# Altium footprint library Switches.PcbLib: 69 footprints (part 4 of 5)
Each footprint in its own frame and in the unit in brackets; x right, y up, seen from the top. Pads: shape width x height; smd on the part's side, far side on the other; paste and mask are expansions set on the pad; w line width, h text height; cw(c..) or ccw(c..) is an arc to the next point about the centre after c.
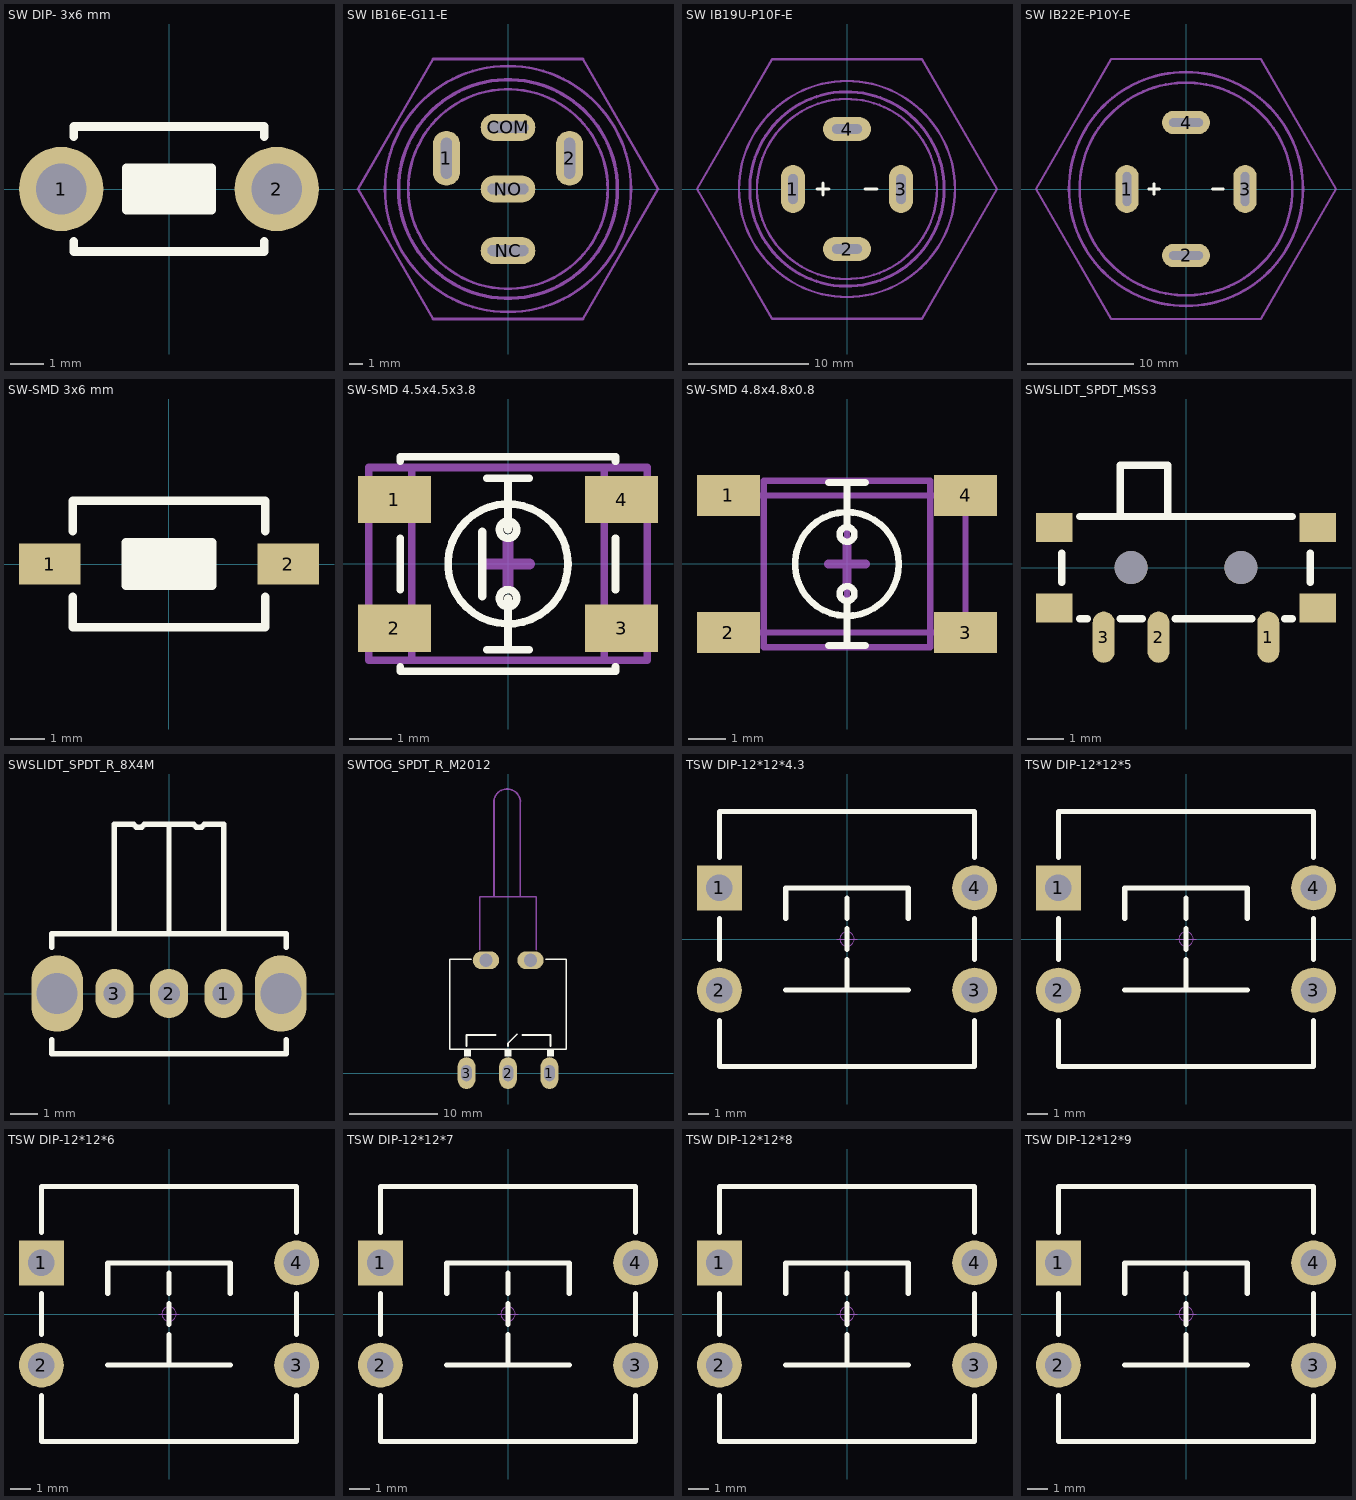
[diagram p3: the footprints below, top view; thin cyan lines are the x and y axes]

## SW DIP- 3x6 mm [mm] "Switch DIP type"
pads (2):
  round 2.5 hole 1.5: 1(-3.2,0) 2(3.2,0)
Top Overlay:
  rectangle: -1.27,-0.635 1.27,0.635
  lines w0.254: -2.819,-1.554 -2.819,-1.854 2.819,-1.854 2.819,-1.554 ; -2.819,1.554 -2.819,1.854 2.819,1.854 2.819,1.554 ; -1.27,-0.635 1.27,-0.635 1.27,0.635 -1.27,0.635 -1.27,-0.635
Top Designator:
  text ".Designator" at -3.71,-0.344 h1.52
3D body "NutNhan2ChanDIP.STEP": height 3.8, standoff -3.47, extent -3.82,-1.75 3.82,1.75

## SW IB16E-G11-E [mm]
pads (5):
  oval 2x4 hole 0.8 slot 3 at 90 deg: 1(-4.5,2.25) 2(4.5,2.25)
  oval 4x2 hole 0.8 slot 3 at 0 deg: COM(0,4.5) NC(0,-4.5) NO(0,0)
Mechanical 1:
  circle w0.2: c0,0 r7.3
  circle w0.254: c0,0 r8
Top Designator:
  text ".Designator" at -3.71,-0.344 h1.52
Mechanical 15:
  circle w0.2: c0,0 r9
  lines w0.2: -10.97,0 -5.485,-9.5 5.485,-9.5 10.97,0 5.485,9.5 -5.485,9.5 -10.97,0
3D body: height 28.3, standoff 0, extent -8,-8 8,8
3D body: height 28.3, standoff 25.3, extent -10.97,-9.5 10.97,9.5

## SW IB19U-P10F-E [mm]
pads (4):
  oval 2x4 hole 0.8 slot 2.5 at 90 deg: 1(-4.5,0) 3(4.5,0)
  oval 4x2 hole 0.8 slot 2.5 at 0 deg: 2(0,-5) 4(0,5)
Top Overlay:
  lines w0.254: -2.5,0 -1.5,0 ; -2,-0.5 -2,0.5 ; 1.5,0 2.5,0
Mechanical 1:
  circle w0.254: c0,0 r8.1
  circle w0.2: c0,0 r7.5
Top Designator:
  text ".Designator" at -3.71,-0.344 h1.52
Mechanical 15:
  circle w0.2: c0,0 r9
  lines w0.2: -12.5,0 -6.25,10.825 6.25,10.825 12.5,0 6.25,-10.825 -6.25,-10.825 -12.5,0
3D body: height 17.45, standoff 14.78, extent -12.5,-10.825 12.5,10.825
3D body: height 17.44, standoff 0, extent -8.1,-8.1 8.1,8.1

## SW IB22E-P10Y-E [mm]
pads (4):
  oval 2.2x4.5 hole 0.8 slot 3.2 at 90 deg: 1(-5.55,0) 3(5.55,0)
  oval 4.5x2.2 hole 0.8 slot 3.2 at 0 deg: 2(0,-6.25) 4(0,6.25)
Top Overlay:
  lines w0.254: -3.5,0 -2.5,0 ; -3,-0.5 -3,0.5 ; 2.5,0 3.5,0
Mechanical 1:
  circle w0.254: c0,0 r10
Top Designator:
  text ".Designator" at -3.71,-0.344 h1.52
Mechanical 15:
  circle w0.254: c0,0 r11
  lines w0.2: -14.1,0 -7.05,-12.211 7.05,-12.211 14.1,0 7.05,12.211 -7.05,12.211 -14.1,0
3D body: height 20, standoff 17, extent -14.1,-12.211 14.1,12.211
3D body: height 20, standoff 0, extent -11,-11 11,11

## SW-SMD 3x6 mm [mm] "Switch SMD type"
pads (2):
  rect 1.8x1.2 smd: 1(-3.5,0) 2(3.5,0)
Top Overlay:
  rectangle: -1.27,-0.635 1.27,0.635
  lines w0.254: -2.819,-0.965 -2.819,-1.854 2.819,-1.854 2.819,-0.965 ; -2.819,0.965 -2.819,1.854 2.819,1.854 2.819,0.965 ; -1.27,-0.635 -1.27,0.635 1.27,0.635 1.27,-0.635 -1.27,-0.635
Top Designator:
  text ".Designator" at -3.71,-0.344 h1.52
3D body "User Library-Button-SMD.step": height 2.5, standoff 0, extent -3.05,-1.85 3.05,1.85

## SW-SMD 4.5x4.5x3.8 [mm] "Switch SMD type"
pads (4):
  rect 1.7x1.1 smd: 1(-2.65,1.5) 2(-2.65,-1.5) 3(2.65,-1.5) 4(2.65,1.5)
Top Overlay:
  circle w0.178: c0,0.8 r0.2
  circle w0.178: c0,-0.8 r0.2
  circle w0.178: c0,0 r1.4
  lines w0.178: -2.516,-2.4 -2.516,-2.505 2.508,-2.505 2.508,-2.4 ; -2.516,-0.6 -2.516,0.6 ; -2.516,2.4 -2.516,2.502 2.508,2.502 2.508,2.4 ; -0.5,-2 0.5,-2 ; -0.5,2 0.5,2 ; 0,-2 0,-0.8 ; 0,0.8 0,2 ; 2.508,-0.6 2.508,0.6
  lines w0.2: -0.6,-0.75 -0.6,0.75
Top 3D Body:
  lines w0.178: -3.25,-2.25 3.25,-2.25 3.25,2.25 -3.25,2.25 -3.25,-2.25
Top Designator:
  text ".Designator" at -3.71,-0.346 h1.52
Mechanical 15:
  lines w0.178: -2.25,-2.25 2.25,-2.25 2.25,2.25 -2.25,2.25 -2.25,-2.25
  lines w0.254: -0.5,0 0.5,0 ; 0,-0.5 0,0.5

## SW-SMD 4.8x4.8x0.8 [mm] "Switch SMD type"
pads (4):
  rect 1.7x1.1 smd: 1(-3.2,1.85) 2(-3.2,-1.85) 3(3.2,-1.85) 4(3.2,1.85)
Top Overlay:
  circle w0.178: c0,0 r1.4
  circle w0.178: c0,-0.8 r0.2
  circle w0.178: c0,0.8 r0.2
  lines w0.178: -0.5,-2.2 0.5,-2.2 ; -0.5,2.2 0.5,2.2 ; 0,-2.2 0,-1 ; 0,1 0,2.2
Top 3D Body:
  lines w0.15: -3.2,-1.85 3.2,-1.85 3.2,1.85 -3.2,1.85 ; 0,-1.85 0,1.85
Top Designator:
  text ".Designator" at -3.71,-0.344 h1.52
Mechanical 15:
  lines w0.178: -2.25,-2.25 -2.25,2.25 2.25,2.25 2.25,-2.25 -2.25,-2.25
  lines w0.254: -0.5,0 0.5,0 ; 0,-0.5 0,0.5

## SWSLIDT_SPDT_MSS3 [mm] "Switch, Slide, SPDT,"
pads (9):
  oval 0.6x1.4 smd: 1(2.25,-1.9) 2(-0.75,-1.9) 3(-2.25,-1.9)
  rect 1x0.8 smd: ""(-3.6,-1.1) ""(-3.6,1.1) ""(3.6,-1.1) ""(3.6,1.1)
  round 0.9 hole 0.9 unplated: ""(-1.5,0) ""(1.5,0)
Top Overlay:
  lines w0.2: -3.4,-0.4 -3.4,0.4 ; -2.9,-1.4 -2.7,-1.4 ; -2.9,1.4 2.9,1.4 ; -1.8,-1.4 -1.2,-1.4 ; -1.8,1.4 -1.8,2.8 -0.5,2.8 -0.5,1.4 ; -0.3,-1.4 1.8,-1.4 ; 2.7,-1.4 2.9,-1.4 ; 3.4,-0.4 3.4,0.4
Top Designator:
  text ".Designator" at -3.71,-0.245 h1.52
3D body "User Library-MSS3_slide_switch_v2.step": height 1.4, standoff -0.5, extent -3.85,-2.24 3.85,2.76

## SWSLIDT_SPDT_R_8X4M [mm] "Subminiator SPDT switch"
pads (5):
  oval 1.4x1.8 hole 0.8: 1(2,0) 2(0,0) 3(-2,0)
  oval 1.9x2.8 hole 1.5: ""(-4.1,0) ""(4.1,0)
Top Overlay:
  lines w0.2: -4.3,-1.7 -4.3,-2.2 4.3,-2.2 4.3,-1.7 ; -4.3,1.7 -4.3,2.2 4.3,2.2 4.3,1.7 ; -2,2.2 -2,6.2 ; 0,2.2 0,6.2 ; 2,2.2 2,6.2 1.3,6.2 1.2,6.1 1,6.1 0.9,6.2 0,6.2 ; -2,6.2 -1.3,6.2 -1.2,6.1 -1,6.1 -0.9,6.2 0,6.2 ; -2,6.2 -2,6.2 ; 0,6.2 0,6.2 ; 0,6.2 0,6.2
Top Designator:
  text ".Designator" at -3.71,1.656 h1.52
3D body "User Library-CK_Slide.step": height 4.7, standoff -2.79, extent -4.311,-2.279 4.3,6.093

## SWTOG_SPDT_R_M2012 [mm] "Switch Toggle, SPDT, THD, RightAngLe, NKK M2012SA2W30, MTS-102-C3"
height 6.5
pads (5):
  oval 2x3.6 hole 1.2 slot 1.8 at 90 deg: 1(4.7,0) 2(0,0) 3(-4.7,0)
  oval 3x2 hole 1.5: ""(-2.5,12.8) ""(2.549,12.8)
Top Overlay:
  rectangle: 4.4,1.9 5.2,2.7
  rectangle: -5,1.9 -4.2,2.7
  rectangle: -0.4,1.9 0.4,2.7
  lines w0.2: -4.699,3.064 -4.699,4.334 -1.397,4.334 ; -4.2,12.9 -6.6,12.9 -6.6,2.7 6.6,2.7 6.6,12.9 4.3,12.9 ; 0,3.038 0,3.394 1.016,4.41 ; 1.651,4.334 4.826,4.334 4.826,3.038
Mechanical 1:
  lines w0.2: -3.2,13.995 -3.2,20 3.2,20 3.2,14 ; -1.6,20 -1.6,30.9 cw(c-0.1,30.7) 1.408,30.831 ; 1.4,20.1 1.4,30.83
Top Designator:
  text ".Designator" at -3.71,14.862 h1.52
3D body "SW3dPS-Switch toggle NKK M2012SA2W30.STEP": height 8.06, standoff -4.18, extent -6.502,-0.575 6.502,32.226

## TSW DIP-12*12*4.3 [mm] "12*12*4.3mm"
pads (4):
  rect 2.2x2.2 hole 1.3: 1(-6.25,2.5)
  round 2.2 hole 1.3: 2(-6.25,-2.5) 3(6.25,-2.5) 4(6.25,2.5)
Top Overlay:
  lines w0.254: -6.25,-4 -6.25,-6.25 6.25,-6.25 6.25,-4 ; -6.25,-1 -6.25,1 ; -6.25,4 -6.25,6.25 6.25,6.25 6.25,4 ; -3,-2.5 3,-2.5 ; -3,1 -3,2.5 3,2.5 3,1 ; 0,-2.5 0,-1 ; 0,-0.5 0,0.5 ; 0,1 0,2 ; 6.25,-1 6.25,1
Top Designator:
  text ".Designator" at -3.71,-0.344 h1.52
Mechanical 15:
  circle w0.05: c0,0 r0.35
  lines w0.05: -0.5,0 0.5,0 ; 0,-0.5 0,0.5
3D body "TSW DIP-12x12x4.3.STEP": height 4.45, standoff -3.35, extent -6.896,-6 6.896,6

## TSW DIP-12*12*5 [mm] "12*12*5mm"
pads (4):
  rect 2.2x2.2 hole 1.3: 1(-6.25,2.5)
  round 2.2 hole 1.3: 2(-6.25,-2.5) 3(6.25,-2.5) 4(6.25,2.5)
Top Overlay:
  lines w0.254: -6.25,-4 -6.25,-6.25 6.25,-6.25 6.25,-4 ; -6.25,-1 -6.25,1 ; -6.25,4 -6.25,6.25 6.25,6.25 6.25,4 ; -3,-2.5 3,-2.5 ; -3,1 -3,2.5 3,2.5 3,1 ; 0,-2.5 0,-1 ; 0,-0.5 0,0.5 ; 0,1 0,2 ; 6.25,-1 6.25,1
Top Designator:
  text ".Designator" at -3.71,-0.344 h1.52
Mechanical 15:
  circle w0.05: c0,0 r0.35
  lines w0.05: -0.5,0 0.5,0 ; 0,-0.5 0,0.5
3D body "TSW DIP-12x12x5.STEP": height 5.15, standoff -3.35, extent -6.896,-6 6.896,6

## TSW DIP-12*12*6 [mm] "12*12*6mm"
pads (4):
  rect 2.2x2.2 hole 1.3: 1(-6.25,2.5)
  round 2.2 hole 1.3: 2(-6.25,-2.5) 3(6.25,-2.5) 4(6.25,2.5)
Top Overlay:
  lines w0.254: -6.25,-4 -6.25,-6.25 6.25,-6.25 6.25,-4 ; -6.25,-1 -6.25,1 ; -6.25,4 -6.25,6.25 6.25,6.25 6.25,4 ; -3,-2.5 3,-2.5 ; -3,1 -3,2.5 3,2.5 3,1 ; 0,-2.5 0,-1 ; 0,-0.5 0,0.5 ; 0,1 0,2 ; 6.25,-1 6.25,1
Top Designator:
  text ".Designator" at -3.71,-0.344 h1.52
Mechanical 15:
  circle w0.05: c0,0 r0.35
  lines w0.05: -0.5,0 0.5,0 ; 0,-0.5 0,0.5
3D body "TSW DIP-12x12x6.STEP": height 6.15, standoff -3.35, extent -6.896,-6 6.896,6

## TSW DIP-12*12*7 [mm] "12*12*7mm"
pads (4):
  rect 2.2x2.2 hole 1.3: 1(-6.25,2.5)
  round 2.2 hole 1.3: 2(-6.25,-2.5) 3(6.25,-2.5) 4(6.25,2.5)
Top Overlay:
  lines w0.254: -6.25,-4 -6.25,-6.25 6.25,-6.25 6.25,-4 ; -6.25,-1 -6.25,1 ; -6.25,4 -6.25,6.25 6.25,6.25 6.25,4 ; -3,-2.5 3,-2.5 ; -3,1 -3,2.5 3,2.5 3,1 ; 0,-2.5 0,-1 ; 0,-0.5 0,0.5 ; 0,1 0,2 ; 6.25,-1 6.25,1
Top Designator:
  text ".Designator" at -3.71,-0.344 h1.52
Mechanical 15:
  circle w0.05: c0,0 r0.35
  lines w0.05: -0.5,0 0.5,0 ; 0,-0.5 0,0.5
3D body "TSW DIP-12x12x7.STEP": height 7.15, standoff -3.35, extent -6.896,-6 6.896,6

## TSW DIP-12*12*8 [mm] "12*12*8mm"
pads (4):
  rect 2.2x2.2 hole 1.3: 1(-6.25,2.5)
  round 2.2 hole 1.3: 2(-6.25,-2.5) 3(6.25,-2.5) 4(6.25,2.5)
Top Overlay:
  lines w0.254: -6.25,-4 -6.25,-6.25 6.25,-6.25 6.25,-4 ; -6.25,-1 -6.25,1 ; -6.25,4 -6.25,6.25 6.25,6.25 6.25,4 ; -3,-2.5 3,-2.5 ; -3,1 -3,2.5 3,2.5 3,1 ; 0,-2.5 0,-1 ; 0,-0.5 0,0.5 ; 0,1 0,2 ; 6.25,-1 6.25,1
Top Designator:
  text ".Designator" at -3.71,-0.344 h1.52
Mechanical 15:
  circle w0.05: c0,0 r0.35
  lines w0.05: -0.5,0 0.5,0 ; 0,-0.5 0,0.5
3D body "TSW DIP-12x12x8.STEP": height 8.15, standoff -3.35, extent -6.896,-6 6.896,6

## TSW DIP-12*12*9 [mm] "12*12*9mm"
pads (4):
  rect 2.2x2.2 hole 1.3: 1(-6.25,2.5)
  round 2.2 hole 1.3: 2(-6.25,-2.5) 3(6.25,-2.5) 4(6.25,2.5)
Top Overlay:
  lines w0.254: -6.25,-4 -6.25,-6.25 6.25,-6.25 6.25,-4 ; -6.25,-1 -6.25,1 ; -6.25,4 -6.25,6.25 6.25,6.25 6.25,4 ; -3,-2.5 3,-2.5 ; -3,1 -3,2.5 3,2.5 3,1 ; 0,-2.5 0,-1 ; 0,-0.5 0,0.5 ; 0,1 0,2 ; 6.25,-1 6.25,1
Top Designator:
  text ".Designator" at -3.71,-0.344 h1.52
Mechanical 15:
  circle w0.05: c0,0 r0.35
  lines w0.05: -0.5,0 0.5,0 ; 0,-0.5 0,0.5
3D body "TSW DIP-12x12x9.STEP": height 9.15, standoff -3.35, extent -6.896,-6 6.896,6